# Altium footprint library Resistors.PcbLib: 8 footprints
Each footprint in its own frame and in the unit in brackets; x right, y up, seen from the top. Pads: shape width x height; smd on the part's side, far side on the other; paste and mask are expansions set on the pad; w line width, h text height; cw(c..) or ccw(c..) is an arc to the next point about the centre after c.
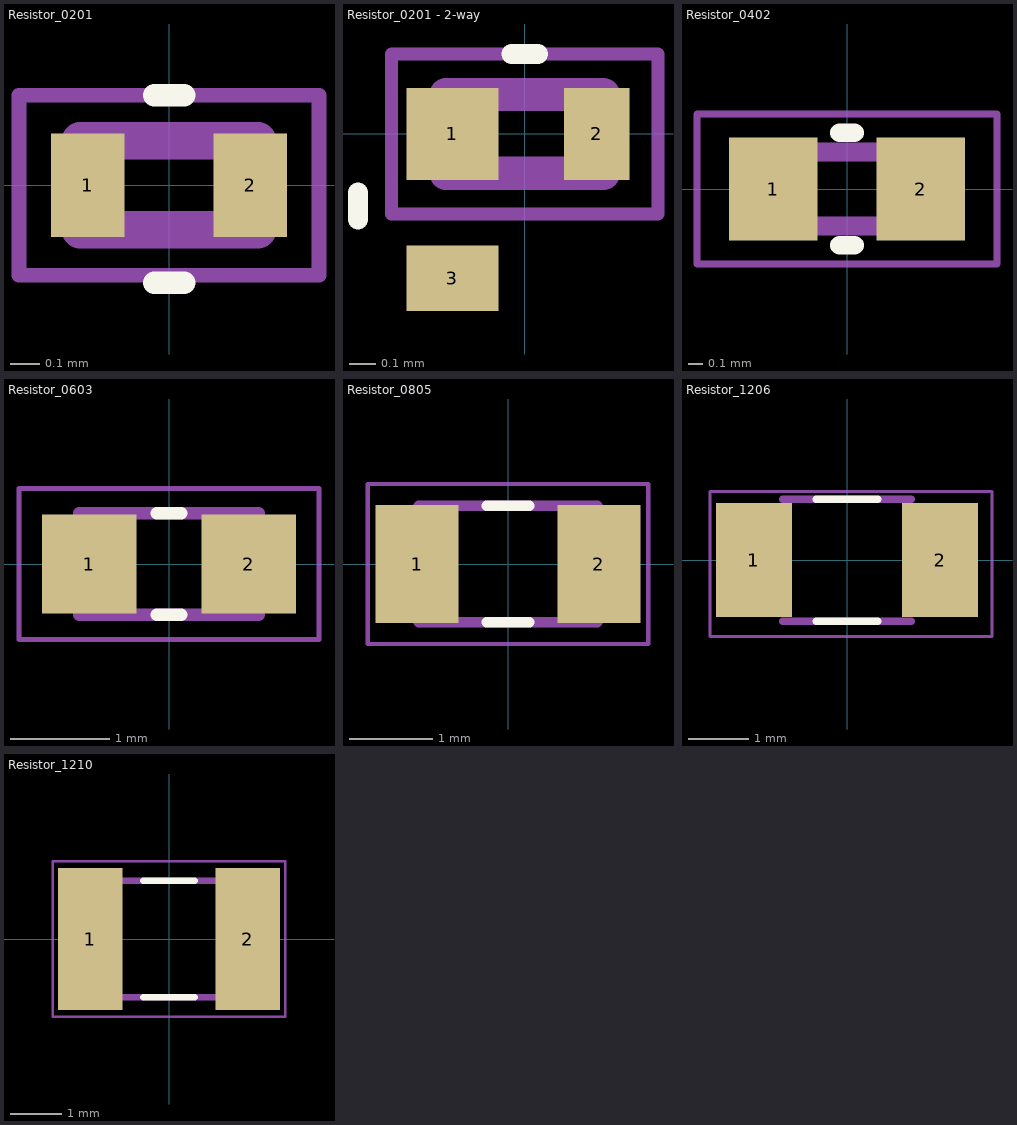
[diagram p0: the footprints below, top view; thin cyan lines are the x and y axes]

## PCBComponent_1 [mm]

## Resistor_0201 [mm]
pads (2):
  rect 0.25x0.35 smd mask+0.025: 1(-0.275,0) 2(0.275,0)
Top Overlay:
  lines w0.076: -0.051,-0.33 0.051,-0.33 ; -0.051,0.305 0.051,0.305
Mechanical 13:
  lines w0.127: -0.3,-0.15 0.3,-0.15 0.3,0.15 -0.3,0.15 -0.3,-0.15
Mechanical 15:
  lines w0.05: -0.508,-0.305 0.508,-0.305 0.508,0.305 -0.508,0.305 -0.508,-0.305
3D body "YAG_R0201_YAG.step": height 0.25, standoff 0, extent -0.318,-0.165 0.318,0.165

## Resistor_0201 - 2-way [mm]
pads (3):
  rect 0.35x0.35 smd mask+0.025: 1(-0.275,0)
  rect 0.25x0.35 smd mask+0.025: 2(0.275,0)
  rect 0.35x0.25 smd mask+0.025: 3(-0.275,-0.55)
Top Overlay:
  lines w0.076: -0.635,-0.326 -0.635,-0.224 ; -0.051,0.305 0.051,0.305
Mechanical 13:
  lines w0.127: -0.3,-0.15 0.3,-0.15 0.3,0.15 -0.3,0.15 -0.3,-0.15
Mechanical 15:
  lines w0.05: -0.508,-0.305 0.508,-0.305 0.508,0.305 -0.508,0.305 -0.508,-0.305
3D body "YAG_R0201_YAG.step": height 0.25, standoff 0, extent -0.318,-0.165 0.318,0.165

## Resistor_0402 [mm]
pads (2):
  rect 0.6x0.7 smd mask+0.025: 1(-0.5,0) 2(0.5,0)
Top Overlay:
  lines w0.127: -0.051,-0.381 0.051,-0.381 ; -0.051,0.381 0.051,0.381
Mechanical 13:
  lines w0.127: -0.5,-0.25 -0.5,0.25 0.5,0.25 0.5,-0.25 -0.5,-0.25
Mechanical 15:
  lines w0.05: -1.016,-0.508 -1.016,0.508 1.016,0.508 1.016,-0.508 -1.016,-0.508
3D body "CAPC1005X55N.step": height 0.4, standoff 0, extent -0.5,-0.246 0.5,0.254

## Resistor_0603 [mm]
pads (2):
  rect 0.95x1 smd mask+0.025: 1(-0.8,0) 2(0.8,0)
Top Overlay:
  lines w0.127: -0.12,-0.51 0.12,-0.51 ; -0.12,0.51 0.12,0.51
Mechanical 13:
  lines w0.127: -0.9,-0.51 -0.9,0.51 0.9,0.51 0.9,-0.51 -0.9,-0.51
Mechanical 15:
  lines w0.05: -1.508,-0.761 -1.508,0.761 1.508,0.761 1.508,-0.761 -1.508,-0.761
3D body "RC0603JR-070RL--3DModel-STEP-510211.STEP": height 0.55, standoff 0, extent -0.8,-0.4 0.8,0.4

## Resistor_0805 [mm]
pads (2):
  rect 1x1.42 smd mask+0.025: 1(-1.092,0) 2(1.092,0)
Top Overlay:
  lines w0.127: -0.254,-0.7 0.254,-0.7 ; -0.254,0.7 0.254,0.7
Mechanical 13:
  lines w0.127: -1.07,-0.7 1.07,-0.7 1.07,0.7 -1.07,0.7 -1.07,-0.7
Mechanical 15:
  lines w0.05: -1.685,-0.96 1.685,-0.96 1.685,0.96 -1.685,0.96 -1.685,-0.96
3D body "RN73C2A499RBTG.STEP": height 0.65, standoff 0, extent -1,-0.625 1,0.625

## Resistor_1206 [mm]
pads (2):
  rect 1.27x1.9 smd mask+0.025: 1(-1.55,0) 2(1.55,0)
Top Overlay:
  lines w0.127: -0.508,-1.016 0.508,-1.016 ; -0.508,1.016 0.508,1.016
Mechanical 13:
  lines w0.127: -1.07,-1.016 1.07,-1.016 ; -1.07,-0.7 -1.07,0.7 ; -1.07,1.016 1.07,1.016 ; 1.07,-0.7 1.07,0.7
Mechanical 15:
  lines w0.05: -2.286,-1.27 2.413,-1.27 2.413,1.143 -2.286,1.143 -2.286,-1.27
3D body "RC1206FR-0710KL.STEP": height 0.65, standoff 0, extent -1.55,-0.8 1.55,0.8

## Resistor_1210 [mm]
pads (2):
  rect 1.27x2.794 smd mask+0.025: 1(-1.55,0) 2(1.55,0)
Top Overlay:
  lines w0.127: -0.508,-1.143 0.508,-1.143 ; -0.508,1.143 0.508,1.143
Mechanical 13:
  lines w0.127: -1.07,-1.143 1.07,-1.143 ; -1.07,-0.7 -1.07,0.7 ; -1.07,1.143 1.07,1.143 ; 1.07,-0.7 1.07,0.7
Mechanical 15:
  lines w0.05: -2.286,-1.524 -2.286,1.524 2.286,1.524 2.286,-1.524 -2.286,-1.524
3D body "RMCF1210_stp.stp": height 0.54, standoff -0.01, extent -1.614,-1.241 1.586,1.259